# Altium schematic symbol library TPS79118DBVR.SchLib: 1 symbol
Pins are listed as number, name and electrical type; pins without a type are passive.

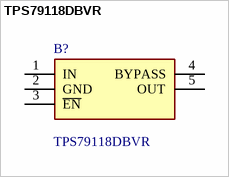
[diagram p0: symbol TPS79118DBVR]

## TPS79118DBVR
designator B?
Ultralow Noise, High PSRR, Fast RF 100-mA Low-Dropout Linear Regulators; Manufacturer_Name: Texas Instruments; Geometry.Height: 1.45mm; Mouser Part Number: 595-TPS79118DBVR; Mouser Price/Stock: https://www.mouser.co.uk/ProductDetail/Texas-Instruments/TPS79118DBVR?qs=5WY7Uqh921zBXwEUn9N4JA%3D%3D; Manufacturer_Part_Number: TPS79118DBVR; Datasheet Link: http://www.ti.com/lit/gpn/tps791
footprint SOT95P280X145-5N
pins: 1 IN, 2 GND, 3 ~{EN}, 4 BYPASS, 5 OUT